# Altium footprint library Janus.PcbLib: 15 footprints
Each footprint in its own frame and in the unit in brackets; x right, y up, seen from the top. Pads: shape width x height; smd on the part's side, far side on the other; paste and mask are expansions set on the pad; w line width, h text height; cw(c..) or ccw(c..) is an arc to the next point about the centre after c.
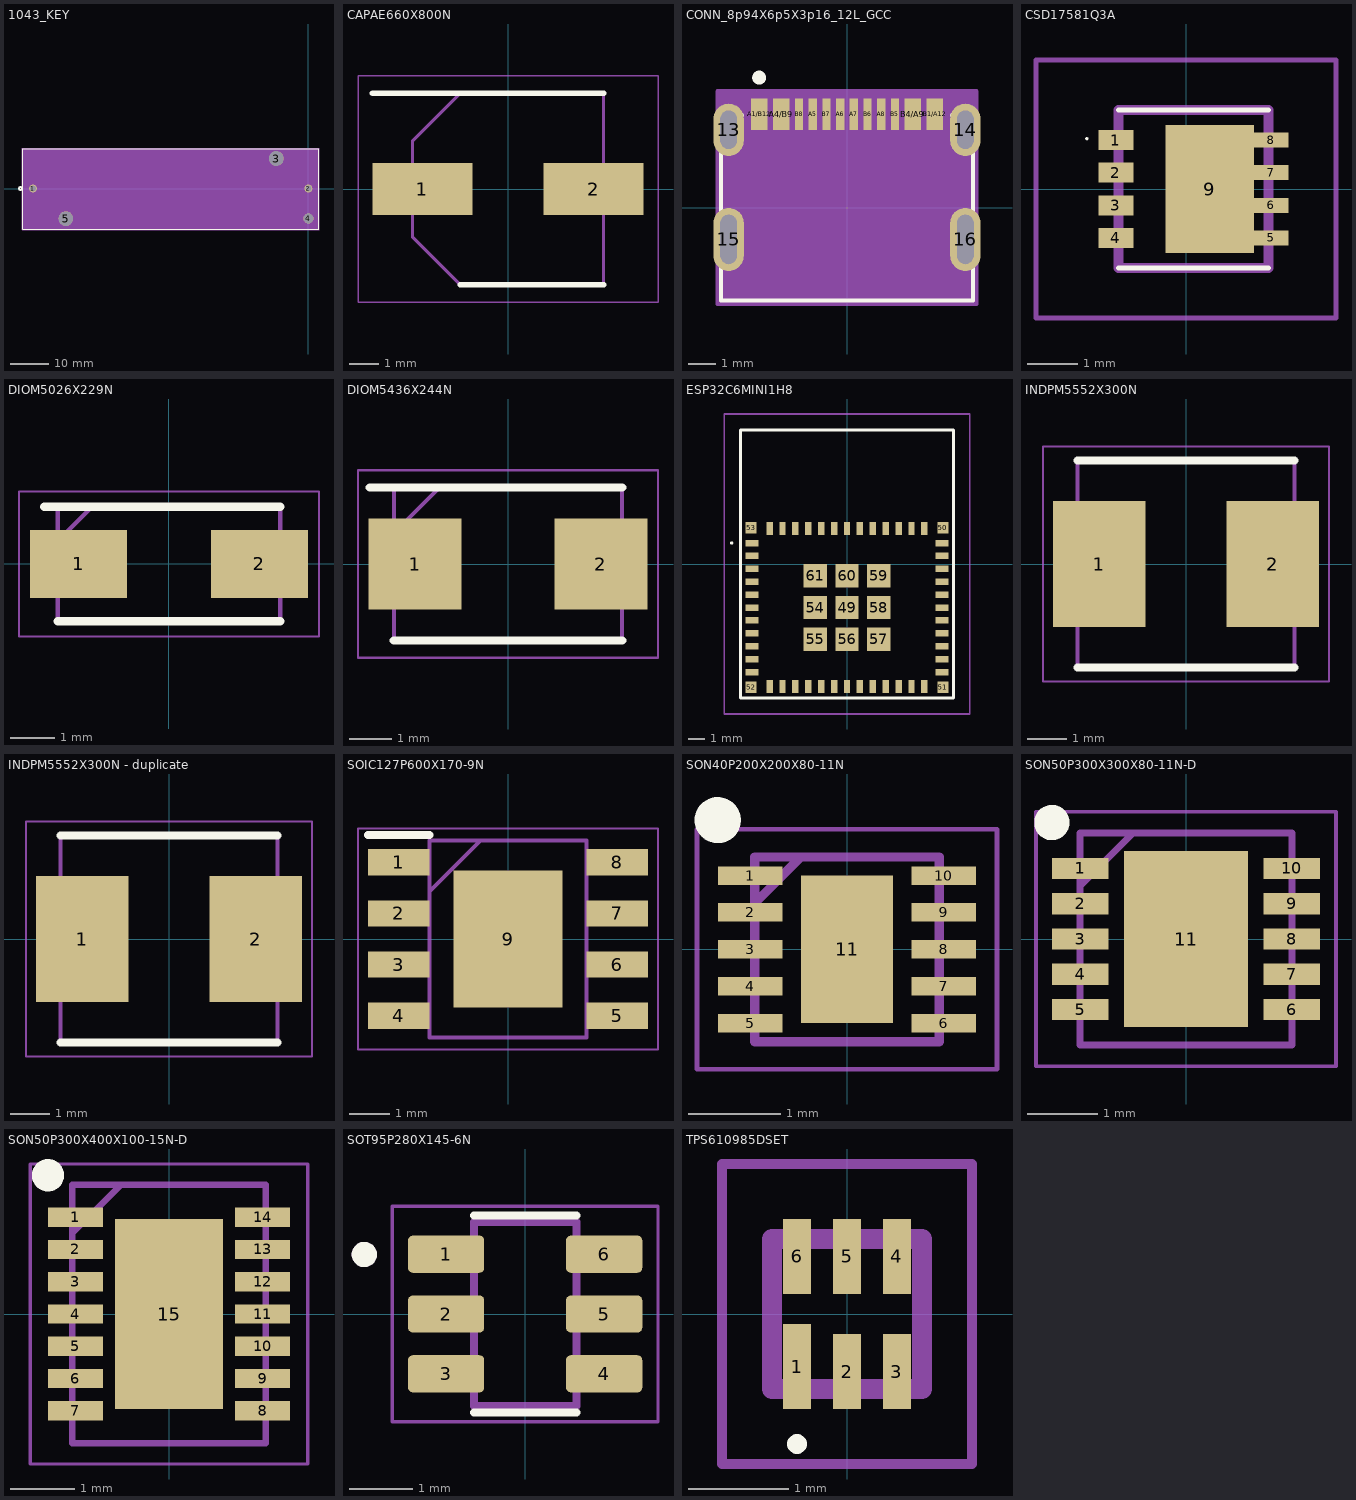
[diagram p0: the footprints below, top view; thin cyan lines are the x and y axes]

## 1043_KEY [mil]
pads (5):
  round 82 hole 62 paste-99999 mask+0: 1(-2845,0) 2(0,0)
  round 150 hole 150 unplated paste-99999 mask+0: 3(-330,310) 5(-2505,-310)
  round 104 hole 104 unplated paste-99999 mask+0: 4(0,-310)
Top Overlay:
  circle w20: c-2974.5,0 r15
  lines w6: -2949.5,-421.5 104.5,-421.5 104.5,411.5 -2949.5,411.5 -2949.5,-421.5
  text ".Designator" at -1560,-25 h50
Bottom Overlay:
  circle w20: c-2974.5,0 r15
Mechanical 13:
  circle w20: c-2845,75 r15
  lines w1: -2944.5,-416.5 99.5,-416.5 99.5,406.5 -2944.5,406.5 -2944.5,-416.5
  text ".Designator" at -1560,-25 h50
Mechanical 15:
  region: 109.5,416.5 -2954.5,416.5 -2954.5,-426.5 109.5,-426.5
  lines w6: -2954.5,-426.5 -2954.5,416.5 109.5,416.5 109.5,-426.5 -2954.5,-426.5

## CAPAE660X800N [mm]
pads (2):
  rect 3.45x1.8 smd: 1(-2.95,0) 2(2.95,0)
Top Overlay:
  lines w0.2: -4.675,3.3 3.3,3.3 ; -1.65,-3.3 3.3,-3.3
Mechanical 15:
  lines w0.1: -3.3,-1.65 -3.3,1.65 -1.65,3.3 3.3,3.3 3.3,-3.3 -1.65,-3.3 -3.3,-1.65
Mechanical 20:
  lines w0.05: -5.175,-3.9 5.175,-3.9 5.175,3.9 -5.175,3.9 -5.175,-3.9

## CONN_8p94X6p5X3p16_12L_GCC [mm]
pads (16):
  oval 1.108x1.908 hole 0.6 slot 1.4 at 90 deg paste-2539.97 mask+0: 13(-4.32,2.849) 14(4.32,2.849)
  oval 1.108x2.308 hole 0.6 slot 1.8 at 90 deg paste-2539.97 mask+0: 15(-4.32,-1.151) 16(4.32,-1.151)
  rect 0.6x1.15 smd paste+0 mask+0: A1/B12(-3.2,3.424) A4/B9(-2.4,3.424) B1/A12(3.2,3.424) B4/A9(2.4,3.424)
  rect 0.3x1.15 smd paste+0 mask+0: A5(-1.25,3.424) A6(-0.25,3.424) A7(0.25,3.424) A8(1.25,3.424) B5(1.75,3.424) B6(0.75,3.424) B7(-0.75,3.424) B8(-1.75,3.424)
Top Overlay:
  circle w0.254: c-3.207,4.753 r0.127
  lines w0.152: -4.597,-1.575 -4.597,-3.378 4.597,-3.378 4.597,-1.575 ; -4.597,-0.727 -4.597,2.425 ; -4.597,3.378 -3.833,3.378 ; 3.833,3.378 4.597,3.378 ; 4.597,-0.727 4.597,2.425
Bottom Overlay:
  circle w0.254: c-3.207,4.753 r0.127
Mechanical 13:
  circle w0.254: c-3.215,2.552 r0.127
  lines w0.025: -4.47,-3.251 4.47,-3.251 4.47,3.251 -4.47,3.251 -4.47,-3.251
Mechanical 15:
  region: 4.724,4.253 -4.724,4.253 -4.724,-3.505 4.724,-3.505
  lines w0.152: -4.724,-3.505 -4.724,4.253 4.724,4.253 4.724,-3.505 -4.724,-3.505

## CSD17581Q3A [mm]
pads (9):
  rect 0.7x0.4 smd: 1(-1.402,0.975) 2(-1.402,0.325) 3(-1.402,-0.325) 4(-1.402,-0.975)
  rect 0.685x0.3 smd: 5(1.706,-0.975) 6(1.706,-0.325) 7(1.706,0.325) 8(1.706,0.975)
  rect 1.775x2.55 smd: 9(0.476,0)
Top Overlay:
  lines w0.032: -1.998,1.006 ccw(c-1.982,1.006) -1.966,1.006 ccw(c-1.982,1.006) -1.998,1.006
  lines w0.1: -1.352,-1.575 1.648,-1.575 ; -1.352,1.575 1.648,1.575
Mechanical 15:
  lines w0.2: -1.352,-1.575 1.648,-1.575 1.648,1.575 -1.352,1.575 -1.352,-1.575
Mechanical 20:
  lines w0.1: -2.998,-2.575 2.998,-2.575 2.998,2.575 -2.998,2.575 -2.998,-2.575

## DIOM5026X229N [mm]
pads (2):
  rect 2.2x1.55 smd: 1(-2.05,0) 2(2.05,0)
Top Overlay:
  lines w0.2: -2.825,1.298 2.52,1.298 ; -2.52,-1.298 2.52,-1.298
Mechanical 15:
  lines w0.1: -2.52,0.522 -1.745,1.298 ; -2.52,-1.298 -2.52,1.298 2.52,1.298 2.52,-1.298 -2.52,-1.298
Mechanical 20:
  lines w0.05: -3.4,-1.645 -3.4,1.645 3.4,1.645 3.4,-1.645 -3.4,-1.645

## DIOM5436X244N [mm]
pads (2):
  rect 2.2x2.15 smd: 1(-2.2,0) 2(2.2,0)
Top Overlay:
  lines w0.2: -3.275,1.81 2.7,1.81 ; -2.7,-1.81 2.7,-1.81
Mechanical 15:
  lines w0.1: -2.7,0.735 -1.625,1.81 ; -2.7,-1.81 -2.7,1.81 2.7,1.81 2.7,-1.81 -2.7,-1.81
Mechanical 20:
  lines w0.05: -3.55,-2.22 -3.55,2.22 3.55,2.22 3.55,-2.22 -3.55,-2.22

## ESP32C6MINI1H8 [mm]
pads (61):
  rect 0.8x0.4 smd: 1(-5.9,1.3) 2(-5.9,0.5) 3(-5.9,-0.3) 4(-5.9,-1.1) 5(-5.9,-1.9) 6(-5.9,-2.7) 7(-5.9,-3.5) 8(-5.9,-4.3) 9(-5.9,-5.1) 10(-5.9,-5.9) 11(-5.9,-6.7) 25(5.9,-6.7) 26(5.9,-5.9) 27(5.9,-5.1) 28(5.9,-4.3) 29(5.9,-3.5) 30(5.9,-2.7) 31(5.9,-1.9) 32(5.9,-1.1) 33(5.9,-0.3) 34(5.9,0.5) 35(5.9,1.3)
  rect 0.4x0.8 smd: 12(-4.8,-7.6) 13(-4,-7.6) 14(-3.2,-7.6) 15(-2.4,-7.6) 16(-1.6,-7.6) 17(-0.8,-7.6) 18(0,-7.6) 19(0.8,-7.6) 20(1.6,-7.6) 21(2.4,-7.6) 22(3.2,-7.6) 23(4,-7.6) 24(4.8,-7.6) 36(4.8,2.2) 37(4,2.2) 38(3.2,2.2) 39(2.4,2.2) 40(1.6,2.2) 41(0.8,2.2) 42(0,2.2) 43(-0.8,2.2) 44(-1.6,2.2) 45(-2.4,2.2) 46(-3.2,2.2) 47(-4,2.2) 48(-4.8,2.2)
  rect 1.45x1.45 smd: 49(0,-2.7) 54(-1.975,-2.7) 55(-1.975,-4.675) 56(0,-4.675) 57(1.975,-4.675) 58(1.975,-2.7) 59(1.975,-0.725) 60(0,-0.725) 61(-1.975,-0.725)
  rect 0.7x0.7 smd: 50(5.95,2.25) 51(5.95,-7.65) 52(-5.95,-7.65) 53(-5.95,2.25)
Top Overlay:
  lines w0.1: -7.2,1.3 cw(c-7.15,1.3) -7.1,1.3 cw(c-7.15,1.3) -7.2,1.3
  lines w0.2: -6.6,-8.3 6.6,-8.3 6.6,8.3 -6.6,8.3 -6.6,-8.3
Mechanical 15:
  lines w0.1: -6.6,-8.3 6.6,-8.3 6.6,8.3 -6.6,8.3 -6.6,-8.3
Mechanical 20:
  lines w0.1: -7.6,-9.3 7.6,-9.3 7.6,9.3 -7.6,9.3 -7.6,-9.3

## INDPM5552X300N [mm]
pads (2):
  rect 2.35x3.2 smd: 1(-2.2,0) 2(2.2,0)
Top Overlay:
  lines w0.2: -2.75,-2.625 2.75,-2.625 ; -2.75,2.625 2.75,2.625
Mechanical 15:
  lines w0.1: -2.75,-2.625 2.75,-2.625 2.75,2.625 -2.75,2.625 -2.75,-2.625
Mechanical 20:
  lines w0.05: -3.625,-2.975 3.625,-2.975 3.625,2.975 -3.625,2.975 -3.625,-2.975

## INDPM5552X300N - duplicate [mm]
pads (2):
  rect 2.35x3.2 smd: 1(-2.2,0) 2(2.2,0)
Top Overlay:
  lines w0.2: -2.75,-2.625 2.75,-2.625 ; -2.75,2.625 2.75,2.625
Mechanical 15:
  lines w0.1: -2.75,-2.625 -2.75,2.625 2.75,2.625 2.75,-2.625 -2.75,-2.625
Mechanical 20:
  lines w0.05: -3.625,-2.975 -3.625,2.975 3.625,2.975 3.625,-2.975 -3.625,-2.975

## SOIC127P600X170-9N [mm]
pads (9):
  rect 1.525x0.65 smd: 1(-2.712,1.905) 2(-2.712,0.635) 3(-2.712,-0.635) 4(-2.712,-1.905) 5(2.712,-1.905) 6(2.712,-0.635) 7(2.712,0.635) 8(2.712,1.905)
  rect 2.71x3.4 smd: 9(0,0)
Top Overlay:
  lines w0.2: -3.475,2.58 -1.95,2.58
Mechanical 15:
  lines w0.1: -1.95,1.18 -0.68,2.45 ; -1.95,-2.45 1.95,-2.45 1.95,2.45 -1.95,2.45 -1.95,-2.45
Mechanical 20:
  lines w0.05: -3.725,-2.75 3.725,-2.75 3.725,2.75 -3.725,2.75 -3.725,-2.75

## SON40P200X200X80-11N [mm]
pads (11):
  rect 0.7x0.2 smd: 1(-1.05,0.8) 2(-1.05,0.4) 3(-1.05,0) 4(-1.05,-0.4) 5(-1.05,-0.8) 6(1.05,-0.8) 7(1.05,-0.4) 8(1.05,0) 9(1.05,0.4) 10(1.05,0.8)
  rect 1x1.6 smd: 11(0,0)
Top Overlay:
  circle w0.25: c-1.4,1.4 r0.125
Mechanical 15:
  lines w0.1: -1,0.5 -0.5,1 ; -1,-1 1,-1 1,1 -1,1 -1,-1
Mechanical 20:
  lines w0.05: -1.625,-1.3 1.625,-1.3 1.625,1.3 -1.625,1.3 -1.625,-1.3

## SON50P300X300X80-11N-D [mm]
pads (11):
  rect 0.8x0.3 smd: 1(-1.5,1) 2(-1.5,0.5) 3(-1.5,0) 4(-1.5,-0.5) 5(-1.5,-1) 6(1.5,-1) 7(1.5,-0.5) 8(1.5,0) 9(1.5,0.5) 10(1.5,1)
  rect 1.75x2.5 smd: 11(0,0)
Top Overlay:
  circle w0.25: c-1.9,1.65 r0.125
Mechanical 15:
  lines w0.1: -1.5,0.75 -0.75,1.5 ; -1.5,-1.5 1.5,-1.5 1.5,1.5 -1.5,1.5 -1.5,-1.5
Mechanical 20:
  lines w0.05: -2.125,-1.8 2.125,-1.8 2.125,1.8 -2.125,1.8 -2.125,-1.8

## SON50P300X400X100-15N-D [mm]
pads (15):
  rect 0.85x0.3 smd: 1(-1.45,1.5) 2(-1.45,1) 3(-1.45,0.5) 4(-1.45,0) 5(-1.45,-0.5) 6(-1.45,-1) 7(-1.45,-1.5) 8(1.45,-1.5) 9(1.45,-1) 10(1.45,-0.5) 11(1.45,0) 12(1.45,0.5) 13(1.45,1) 14(1.45,1.5)
  rect 1.68x2.95 smd: 15(0,0)
Top Overlay:
  circle w0.25: c-1.875,2.15 r0.125
Mechanical 15:
  lines w0.1: -1.5,1.25 -0.75,2 ; -1.5,-2 -1.5,2 1.5,2 1.5,-2 -1.5,-2
Mechanical 20:
  lines w0.05: -2.15,-2.325 -2.15,2.325 2.15,2.325 2.15,-2.325 -2.15,-2.325

## SOT95P280X145-6N [mm]
pads (6):
  rrect25% 1.21x0.59 smd: 1(-1.255,0.95) 2(-1.255,0) 3(-1.255,-0.95) 4(1.255,-0.95) 5(1.255,0) 6(1.255,0.95)
Top Overlay:
  circle w0.2: c-2.555,0.945 r0.1
  lines w0.127: -0.813,-1.565 0.813,-1.565 ; -0.813,1.565 0.813,1.565
Mechanical 13:
  circle w0.2: c-2.555,0.945 r0.1
  lines w0.127: -0.813,-1.462 -0.813,1.462 0.813,1.462 0.813,-1.462 -0.813,-1.462
Mechanical 15:
  lines w0.05: -2.11,-1.713 2.11,-1.713 2.11,1.713 -2.11,1.713 -2.11,-1.713
3D body "step_temp.STEP": height 0.4, standoff -1.05, extent -1.4,-1.462 1.4,1.462

## TPS610985DSET [mm]
pads (6):
  rect 0.28x0.85 smd: 1(-0.5,-0.525)
  rect 0.28x0.75 smd: 2(0,-0.575) 3(0.5,-0.575) 4(0.5,0.575) 5(0,0.575) 6(-0.5,0.575)
Top Overlay:
  lines w0.1: -0.55,-1.3 cw(c-0.5,-1.3) -0.45,-1.3 cw(c-0.5,-1.3) -0.55,-1.3
Mechanical 13:
  lines w0.2: -0.75,-0.75 -0.75,0.75 0.75,0.75 0.75,-0.75 -0.75,-0.75
Mechanical 15:
  lines w0.1: -1.25,-1.5 -1.25,1.5 1.25,1.5 1.25,-1.5 -1.25,-1.5
3D body "BQ29707DSET.stp": height 0.79, standoff -0.01, extent -0.75,-0.75 0.75,0.75